# Altium schematic symbol library DIM.SCHLIB: 488 symbols (part 4 of 5)
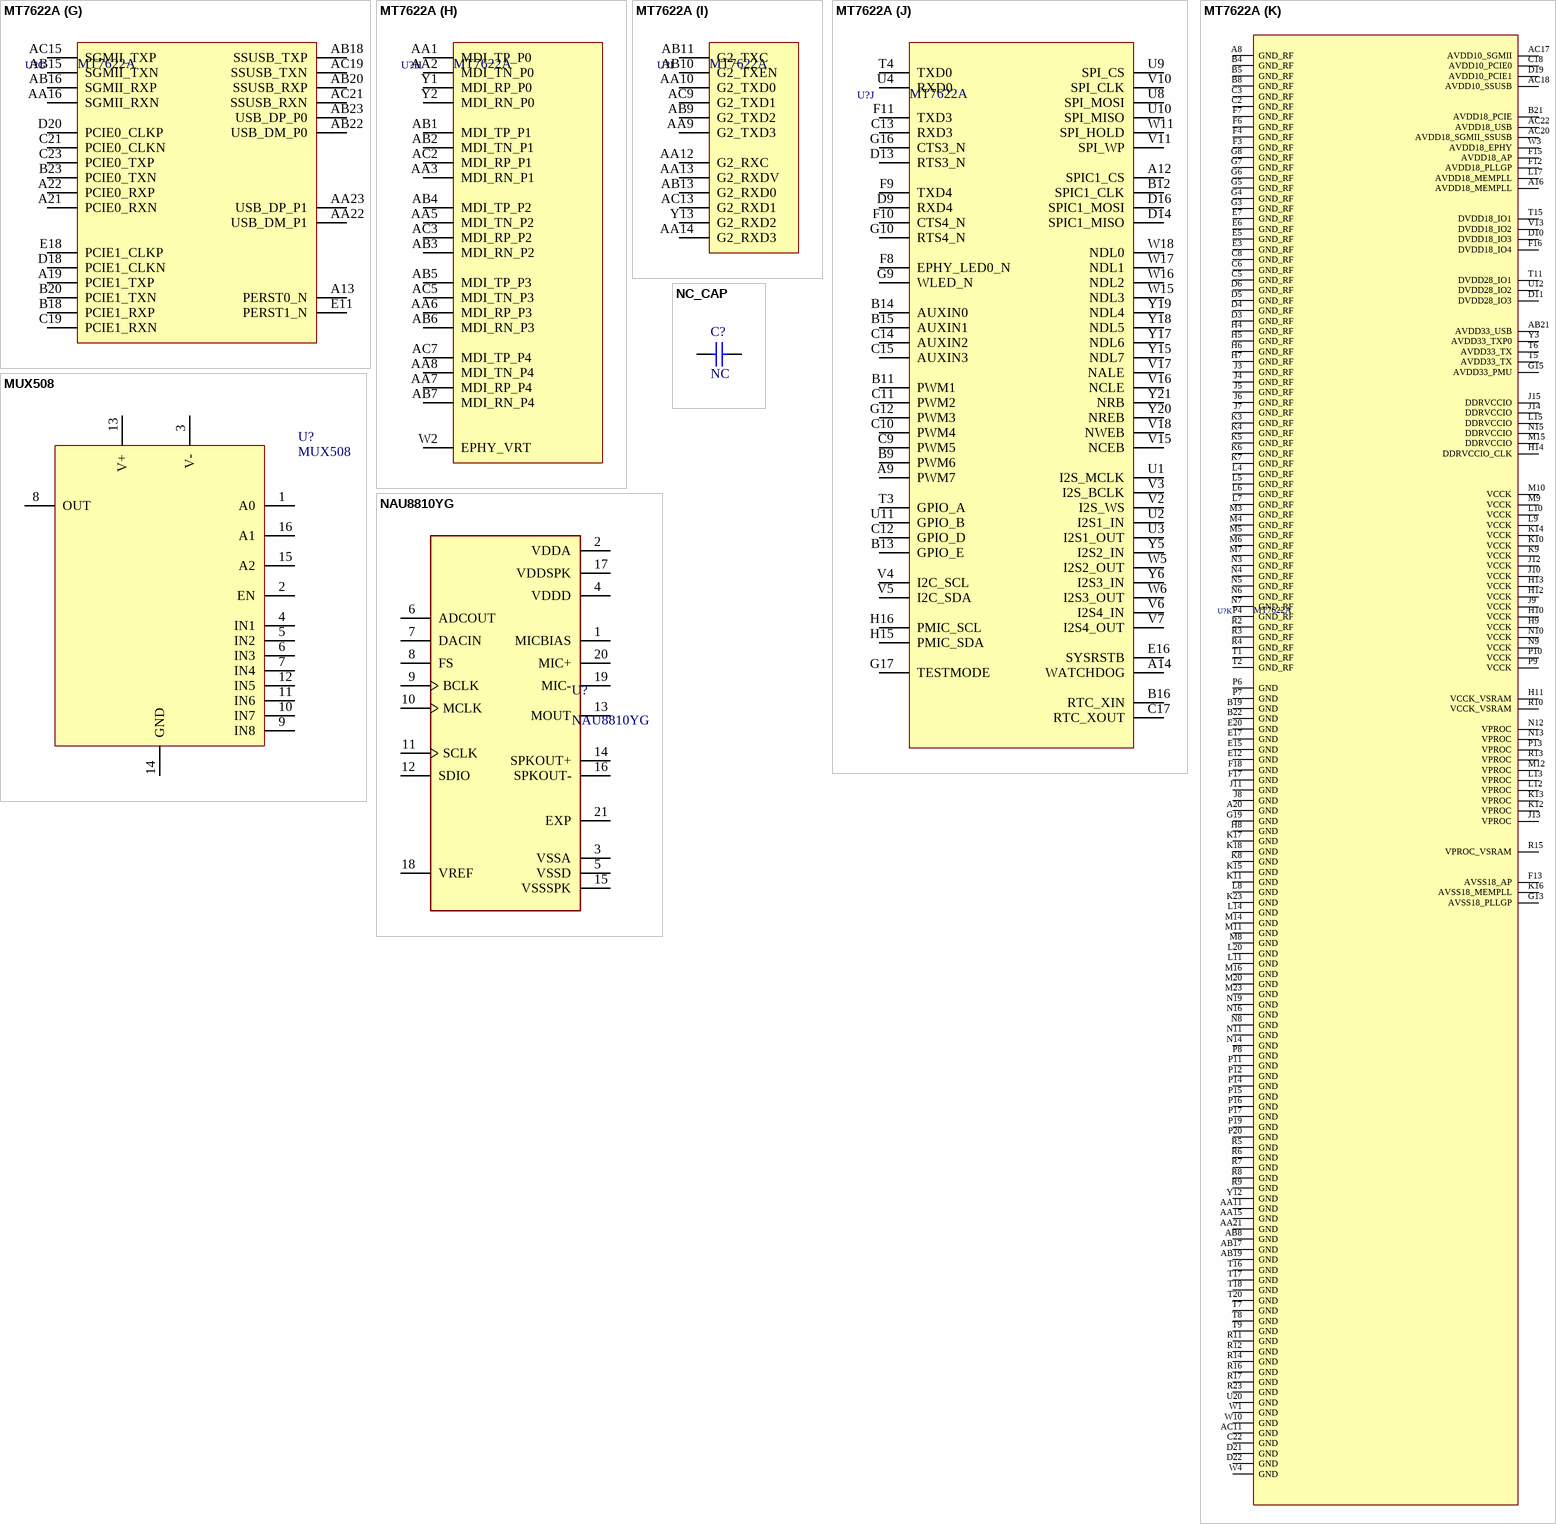
[diagram p28: symbols MT7622A to NC_CAP]

## NC_CAP
designator C?, comment NC
0402 (1005 Metric); Value: NC; Package: 0402 (1005 Metric)
footprint CAP 0402/1005 (Chip Capacitor, 2-Leads, Body 1.02x0.51mm, IPC Medium Density)
pins: 1, 2

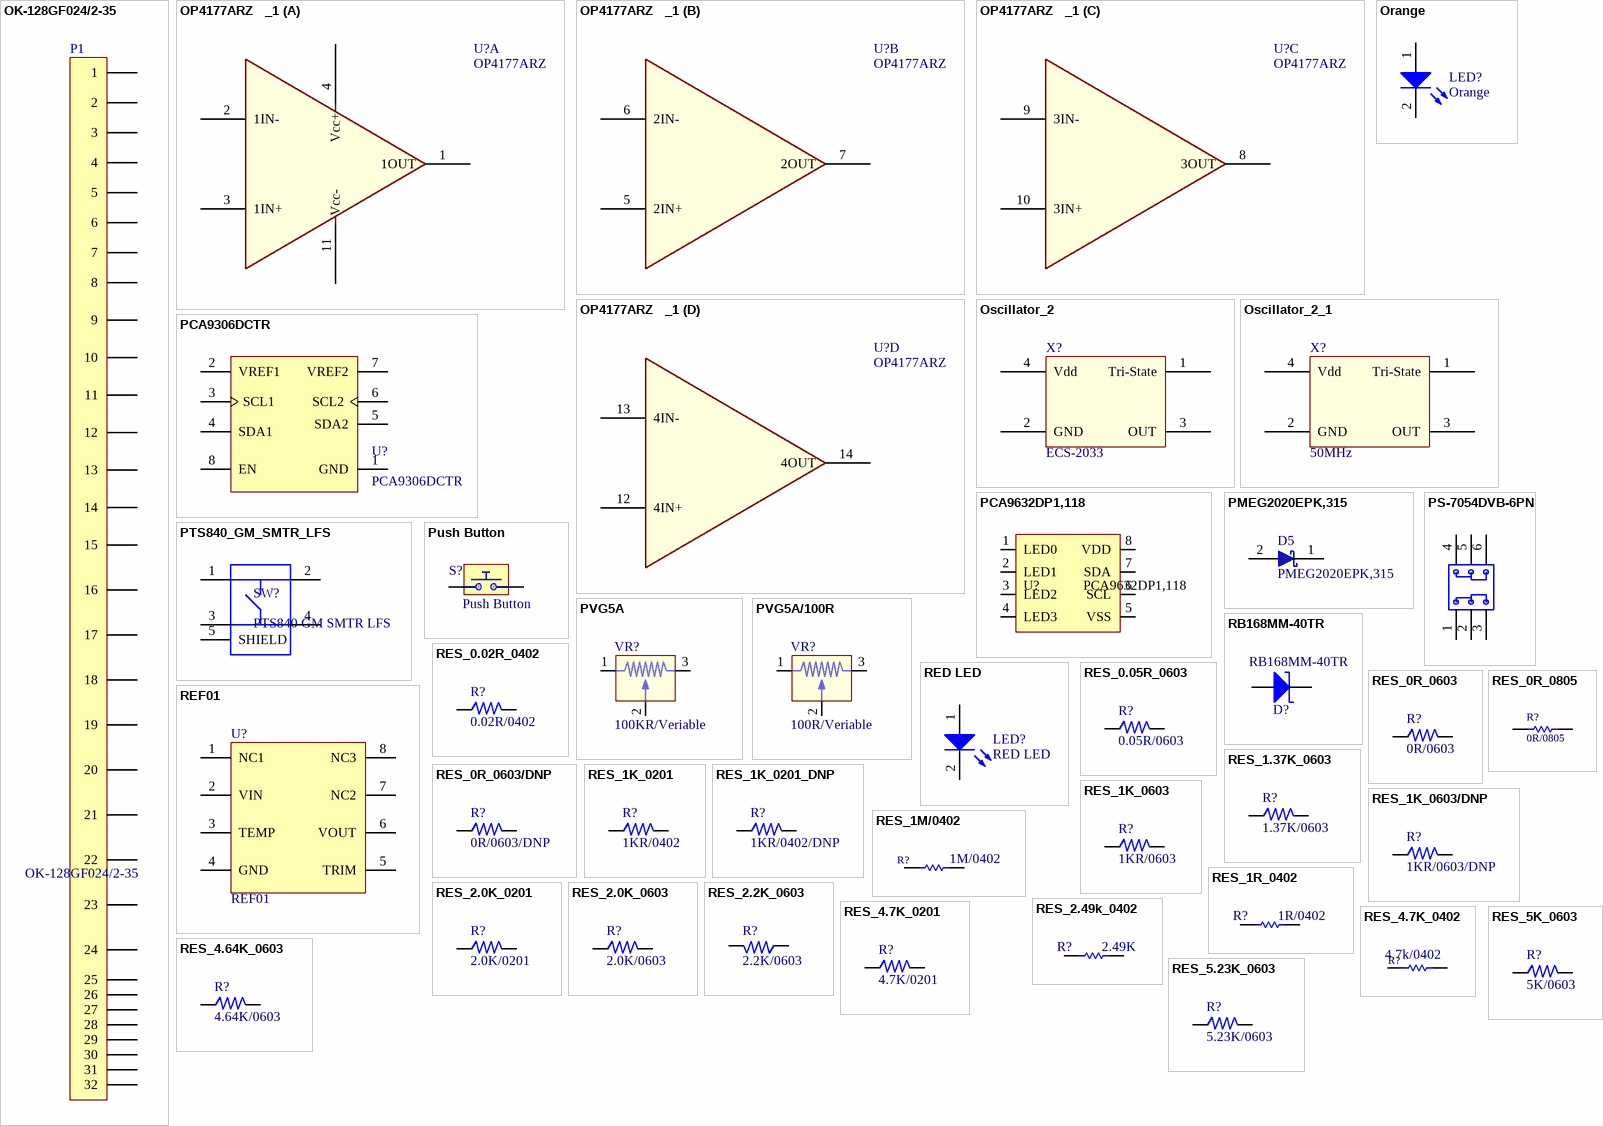
[diagram p20: symbols OK-128GF024/2-35 to RES_5K_0603]

## OK-128GF024/2-35
designator P1
Arrays, Edge Type, Mezzanine (Board to Board) ROHS; Manufacturer Part Number: OK-128GF024/2-35; Supplier: OK-128GF024/2-35; Supplier Part Number: OK-128GF024/2-35; Value: OK-128GF024/2-35
footprint OK-128GF024/2-35
pins: 1, 2, 3, 4, 5, 6, 7, 8, 9, 10, 11, 12, 13, 14, 15, 16, 17, 18, 19, 20, 21, 22, 23, 24, 25, 26, 27, 28, 29, 30, 31, 32

## OP4177ARZ   _1
designator U?, comment OP4177ARZ
IC OPAMP GP 4 CIRCUIT 14SOIC; Manufacturer: Analog Devices Inc.; Value: OP4177ARZ; Package: 14-SOIC (0.154", 3.90mm Width); Manufacturer Part Number: OP4177ARZ; Supplier: Digi-Key; Supplier Part Number: OP4177ARZ-ND; Operating Temperature: -40°C ~ 125°C
footprint SOIC-14
part A pins: 1 1OUT, 2 1IN-, 3 1IN+, 4 Vcc+, 11 Vcc-
part B pins: 5 2IN+, 6 2IN-, 7 2OUT
part C pins: 8 3OUT, 9 3IN-, 10 3IN+
part D pins: 12 4IN+, 13 4IN-, 14 4OUT

## Orange
designator LED?
10mA 无色透明透镜 -40℃~+85℃ 598nm~608nm Orange 120° 40mW 0603 Light Emitting Diodes (LED) ROHS; Manufacturer Part Number: SZYY0603O; Manufacturer: Yongyu Photoelectric; Package: 0603 (1608 Metric); Supplier Part Number: C434425; Value: Orange; Supplier: LCSC; Operating Temperature: -40°C ~ 100°C
footprint LED_1608L (Chip Capacitor, Body 1.6x0.8mm, IPC High Density)
pins: 1 A, 2 K

## Oscillator_2
designator X?, comment ECS-2033
Oscillator_ECS-2033; Manufacturer: ECS Inc.; Manufacturer Part Number: ECS-2033-160-AU; Value: ECS-2033; Package: 4-SMD, No Lead; Supplier: Digikey; Supplier Part Number: XC1858CT-ND
footprint ECS-2033
pins: 1 Tri-State, 2 GND, 3 OUT, 4 Vdd

## Oscillator_2_1
designator X?, comment 50MHz
Oscillator_ECS-2033; Manufacturer: ECS Inc.; Manufacturer Part Number: ECS-2033-500-AU; Value: 50MHz; Package: 4-SMD, No Lead; Supplier: Digikey; Supplier Part Number: XC1866CT-ND
footprint ECS-2033
pins: 1 Tri-State, 2 GND, 3 OUT, 4 Vdd

## PCA9306DCTR
designator U?
1.8V~5.5V 1 2 1.2V~3.3V SM-8 Translators / Level Shifters ROHS; Manufacturer: Texas Instruments; SPN: C123752; MPN: PCA9306DCTR; Package: SM-8; Supplier: LCSC; Value: PCA9306DCTR
footprint SOP65P400X130-8N
pins: 1 GND, 2 VREF1, 3 SCL1, 4 SDA1, 5 SDA2, 6 SCL2, 7  VREF2, 8 EN

## PCA9632DP1,118
designator U?
LED Lighting Drivers 4-BIT FM+I2C-BUS; Manufacturer: NXP Semiconductors; SPN: 771-PCA9632DP1118; Package: 0402; MPN: PCA9632DP1,118; Supplier: Mouser; Value: PCA9632DP1,118
pins: 1 LED0, 2 LED1, 3 LED2, 4 LED3, 5 VSS, 6 SCL, 7 SDA, 8 VDD

## PMEG2020EPK,315
designator D5
DIODE SCHOTTKY 20V 2A DFN1608D-2; MF: Nexperia USA Inc.; MPN: PMEG2020EPK,315; Package: DFN1608D-2; ComponentLink1URL: https://datasheet.ciiva.com/23793/1749685-23793352.pdf?src-supplier=Newark; ComponentLink1Description: https://datasheet.ciiva.com/23793/1749685-23793352.pdf?src-supplier=Newark
footprint PMEG2020EPK315
pins: 1 K, 2 A

## PS-7054DVB-6PN
designator SW?  (value not drawn)
SWITCH PUSH 500mA 24V; SPN: C22363820; MF: G-Switch(品赞); MPN: PS-7054DVB-6PN; Package: 6P,7x7mm; Supplier: LCSC
footprint SW-TH_6P-L7.0-W7.0-P2.00
pins: 1, 2, 3, 4, 5, 6

## PTS840_GM_SMTR_LFS
designator SW?, comment PTS840 GM SMTR LFS
Tactile Switch SPST-NO Side Actuated Surface Mount, Right Angle; MF: C&K; Price: None; SnapEDA_Link: https://www.snapeda.com/parts/PTS840%20GM%20SMTR%20LFS/C&K/view-part/628485/?ref=snap; MPN: PTS840 GM SMTR LFS; Availability: Unavailable; Value: *; Package: None
footprint SW_PTS840GMSMTRLFS
pins: 1, 2, 3, 4, 5 SHIELD

## Push Button
designator S?
2.93mm 2mm Round Button 50mA Brick nogging 3.9mm SPST 12V SMD,3x4mm Tactile Switches ROHS; Manufacturer: XUNPU; MPN: TS-1088R-02026; SPN: C455280; Value: Push Button; Package: SMD,3x4mm; Supplier: LCSC; Operating Temperature: -40°C ~ 85°C
pins: 1, 2

## PVG5A
designator VR?, comment 100KR/Veriable
100KR_Variable Resistor; Manufacturer: Bourns; Manufacturer Part Number: PVG5H104C03R00; Value: 100KR/Veriable; Package: PVG5A; Supplier: Mouser; Supplier Part Number: 81-PVG5H104C03R00
footprint PVG5A
pins: 1 A, 2 B, 3 C

## PVG5A/100R
designator VR?, comment 100R/Veriable
100R_Variable Resistor; Manufacturer: Bourns; Manufacturer Part Number: PVG5A101C03R00; Value: 100R/Veriable; Package: PVG5A; Supplier: Mouser; Supplier Part Number: 81-PVG5A101C03R00
footprint PVG5A
pins: 1 A, 2 B, 3 C

## RB168MM-40TR
designator D?
DIODE SCHOTTKY 40V 1A PMDU; Manufacturer: Rohm Semiconductor; Manufacturer Part Number: RB168MM-40TR; Package: SOD-123F; Supplier: Digi-Key; Supplier Part Number: RB168MM-40CT-ND; Unit Price: *; Value: RB168MM-40TR
footprint RB051MM_ROM
pins: 1 A, 2 K

## RED LED
designator LED?
LED RED CLEAR 625NM 0603 SMD; Manufacturer: QT Brightek (QTB); Manufacturer Part Number: QBLP601-R5; Package: 0603 (1608 Metric); Value: RED LED; Operating Temperature: -40°C ~ 100°C
pins: 1 A, 2 K

## REF01
designator U?
Voltage References 10V PREC VOLT REFERENCE IC; Manufacturer: Analog Devices; Manufacturer Part Number: 5962-8958101PA; Package: CDIP-8; Supplier: Mouser; Supplier Part Number: 584-5962-8958101PA; Unit Price: *; Value: REF01
footprint REF01
pins: 1 NC1, 2 VIN, 3 TEMP, 4 GND, 5 TRIM, 6 VOUT, 7 NC2, 8 NC3

## RES_0.02R_0402
designator R?, comment 0.02R/0402
RES 0.02 OHM 1% 1/3W 0402; Manufacturer: Panasonic Electronic Components; Manufacturer Part Number: ERJ-MFBAF20MX; Package: 0402 (1005 Metric); Supplier: Digi-Key; Supplier Part Number: P123666TR-ND; Value: 0.02R/0402; Operating Temperature: -55°C ~ 155°C
footprint RES 0402/1005 (Chip Resistor, 2-Leads, Body 1.0x0.5mm, IPC Medium Density)
pins: 1, 2

## RES_0.05R_0603
designator R?, comment 0.05R/0603
RES 0.05 OHM 1% 1/3W 0603; Manufacturer: Panasonic Electronic Components; Manufacturer Part Number: ERJ-3BWFR050V; Package: 0603 (1608 Metric); Supplier: Digi-Key; Supplier Part Number: P17472TR-ND; Value: 0.05R/0603
footprint RESC1608L (Chip Resistor, Body 1.6x0.8mm, IPC High Density)
pins: 1, 2

## RES_0R_0603
designator R?, comment 0R/0603
0R; Manufacturer: Yageo; Manufacturer Part Number: RC0603JR-070RL; Package: 0603 (1608 Metric); Supplier: Mouser; Supplier Part Number: 603-RC0603JR-070RL; Value: 0R/0603
footprint RESC1608L (Chip Resistor, Body 1.6x0.8mm, IPC High Density)
pins: 1, 2

## RES_0R_0603/DNP
designator R?, comment 0R/0603/DNP
0R; Manufacturer: Yageo; Manufacturer Part Number: RC0603JR-070RL; Package: 0603 (1608 Metric); Supplier: Mouser; Supplier Part Number: 603-RC0603JR-070RL; Value: 0R/0603/DNP
footprint RESC1608L (Chip Resistor, Body 1.6x0.8mm, IPC High Density)
pins: 1, 2

## RES_0R_0805
designator R?, comment value 0R/0805  (hidden comment: Resistor)
0 Ohms Jumper 0.125W, 1/8W Chip Resistor 0805 (2012 Metric) Automotive AEC-Q200 Thick Film; Manufacturer: Vishay Dale; Manufacturer Part Number: CRCW08050000Z0EA; Package: 0805 (2012 Metric); Supplier: Digikey; Supplier Part Number: 541-0.0ATR-ND; Temperature: -55 to 155
footprint RES 0805/2012 (Chip Resistor, 2-Leads, Body 2.00x1.25mm, IPC High Density)
pins: 1, 2

## RES_1.37K_0603
designator R?, comment 1.37K/0603
RES SMD 1.37K OHM 1% 1/10W 0603; Manufacturer: Yageo; Manufacturer Part Number: RC0603FR-071K37L; Package: 0603 (1608 Metric); Supplier: Digi-Key; Supplier Part Number: 311-1.37KHRTR-ND; Value: 1.37K/0603
footprint RESC1608L (Chip Resistor, Body 1.6x0.8mm, IPC High Density)
pins: 1, 2

## RES_1K_0201
designator R?, comment 1KR/0402
RES SMD 1K OHM 1% 1/20W 0201; Manufacturer: Yageo; Manufacturer Part Number: RC0201FR-071KL; Package: 0201 (0603 Metric); Supplier: Digi-Key; Supplier Part Number: 311-1KMTR-ND; Value: 1KR/0402
footprint RES 0201/0603 (Chip Resistor, 2-Leads, Body 0.60x0.30mm, IPC Medium Density)
pins: 1, 2

## RES_1K_0201_DNP
designator R?, comment 1KR/0402/DNP
RES SMD 1K OHM 1% 1/20W 0201; Manufacturer: Yageo; Manufacturer Part Number: RC0201FR-071KL; Package: 0201 (0603 Metric); Supplier: Digi-Key; Supplier Part Number: 311-1KMTR-ND; Value: 1KR/0402/DNP
footprint RES 0201/0603 (Chip Resistor, 2-Leads, Body 0.60x0.30mm, IPC Medium Density)
pins: 1, 2

## RES_1K_0603
designator R?, comment 1KR/0603
1KR, 0.25w, 1%; Manufacturer: Rohm Semiconductor; Manufacturer Part Number: ESR03EZPF1001; Package: 0603 (1608 Metric); Supplier: Digi-Key; Supplier Part Number: RHM1.00KADCT-ND; Value: 1KR/0603
footprint RESC1608L (Chip Resistor, Body 1.6x0.8mm, IPC High Density)
pins: 1, 2

## RES_1K_0603/DNP
designator R?, comment 1KR/0603/DNP
1KR, 0.25w, 1%; Manufacturer: Rohm Semiconductor; Manufacturer Part Number: ESR03EZPF1001; Package: 0603 (1608 Metric); Supplier: Digi-Key; Supplier Part Number: RHM1.00KADCT-ND; Value: 1KR/0603/DNP
footprint RESC1608L (Chip Resistor, Body 1.6x0.8mm, IPC High Density)
pins: 1, 2

## RES_1M/0402
designator R?, comment 1M/0402
RES SMD 1M OHM 1% 1/10W 0603; Manufacturer: Rohm Semiconductor; Manufacturer Part Number: ESR01MZPJ105; Package: 0402; Supplier: Digikey; Supplier Part Number: RHM1005CT-ND; Temperature: -55 to 155; Value: 1M/0402
footprint RES 0402/1005 (Chip Resistor, 2-Leads, Body 1.0x0.5mm, IPC Medium Density)
pins: 1, 2

## RES_1R_0402
designator R?, comment 1R/0402
Resistor; Manufacturer: Vishay Dale; Manufacturer Part Number: CRCW04021R00JNEDHP; Package: 0402 (1005 Metric); Supplier: DigiKey; Supplier Part Number: 541-1.0YATR-ND; Temperature: -55°C ~ 155°C; Value: 1R/0402
footprint RES 0402/1005 (Chip Resistor, 2-Leads, Body 1.0x0.5mm, IPC Medium Density)
pins: 1, 2

## RES_2.0K_0201
designator R?, comment 2.0K/0201
RES SMD 2K OHM 5% 1/20W 0201; Manufacturer: Yageo; Manufacturer Part Number: RC0201JR-072KL; Package: 0201 (0603 Metric); Supplier: Digi-Key; Supplier Part Number: 311-2KNTR-ND; Value: 2.0K/0201
footprint RES 0201/0603 (Chip Resistor, 2-Leads, Body 0.60x0.30mm, IPC Medium Density)
pins: 1, 2

## RES_2.0K_0603
designator R?, comment 2.0K/0603
RES 2K OHM 0.01% 1/10W 0603; Manufacturer: Stackpole Electronics Inc; Manufacturer Part Number: RNCF0603TKY2K00; Package: 0603 (1608 Metric); Supplier: Digi-Key; Supplier Part Number: RNCF0603TKY2K00TR-ND; Value: 2.0K/0603
footprint RES 0603/1608 (Chip Resistor, 2-Leads, Body 1.60x0.80mm, IPC Medium Density)
pins: 1, 2

## RES_2.2K_0603
designator R?, comment 2.2K/0603
2.2KR; Manufacturer: Yageo; Manufacturer Part Number: SR0603KR-7W2K2L; Package: 0603 (1608 Metric); Supplier: Digi-Key; Supplier Part Number: SR0603KR-7W2K2L-ND; Value: 2.2K/0603; Operating Temperature: -55°C ~ 155°C
footprint RESC1608L (Chip Resistor, Body 1.6x0.8mm, IPC High Density)
pins: 1, 2

## RES_2.49k_0402
designator R?, comment 2.49K
RES 2.49K OHM 1% 1/16W 0402; Manufacturer: Stackpole Electronics Inc; Manufacturer Part Number: RMCF0402FT2K49; Package: 0402 (1005 Metric); Supplier: DigiKey; Supplier Part Number: RMCF0402FT2K49TR-ND; Temperature: -55°C ~ 155°C; Value: 2.49K
footprint RES 0402/1005 (Chip Resistor, 2-Leads, Body 1.0x0.5mm, IPC Medium Density)
pins: 1, 2

## RES_4.7K_0201
designator R?, comment 4.7K/0201
RES SMD 4.7K OHM 1% 1/20W 0201; Manufacturer: Yageo; Manufacturer Part Number: RC0201FR-074K7L; Package: 0201 (0603 Metric); Supplier: Digi-Key; Supplier Part Number: 311-4.70KMTR-ND; Value: 4.7K/0201
footprint RES 0201/0603 (Chip Resistor, 2-Leads, Body 0.60x0.30mm, IPC Medium Density)
pins: 1, 2

## RES_4.7K_0402
designator R?, comment 4.7k/0402
RES SMD 1M OHM 1% 1/10W 0603; Manufacturer: Rohm Semiconductor; Manufacturer Part Number: ESR01MZPJ105; Package: 0402; Supplier: Digikey; Supplier Part Number: RHM1005CT-ND; Temperature: -55 to 155; Value: 4.7k/0402
footprint RES 0402/1005 (Chip Resistor, 2-Leads, Body 1.0x0.5mm, IPC Medium Density)
pins: 1, 2

## RES_4.64K_0603
designator R?, comment 4.64K/0603
RES SMD 4.64K OHM 0.1% 1/5W 0603; Manufacturer: Panasonic Electronic Components; Manufacturer Part Number: ERJ-PB3B4641V; Package: 0603 (1608 Metric); Supplier: Digi-Key; Supplier Part Number: P20047CT-ND; Value: 4.64K/0603
footprint RESC1608L (Chip Resistor, Body 1.6x0.8mm, IPC High Density)
pins: 1, 2

## RES_5.23K_0603
designator R?, comment 5.23K/0603
RES SMD 5.23K OHM 1% 1/10W 0603; Manufacturer: Yageo; Manufacturer Part Number: RC0603FR-075K23L; Package: 0603 (1608 Metric); Supplier: Digi-Key; Supplier Part Number: 311-5.23KHRTR-ND; Value: 5.23K/0603
footprint RESC1608L (Chip Resistor, Body 1.6x0.8mm, IPC High Density)
pins: 1, 2

## RES_5K_0603
designator R?, comment 5K/0603
RES SMD 5K OHM 0.1% 0.15W 0603; Manufacturer: Vishay Thin Film; Manufacturer Part Number: PNM0603E5001BST5; Package: 0603 (1608 Metric); Supplier: Digi-Key; Supplier Part Number: PNM0603-5.0KBCT-ND; Value: 5K/0603
footprint RESC1608L (Chip Resistor, Body 1.6x0.8mm, IPC High Density)
pins: 1, 2

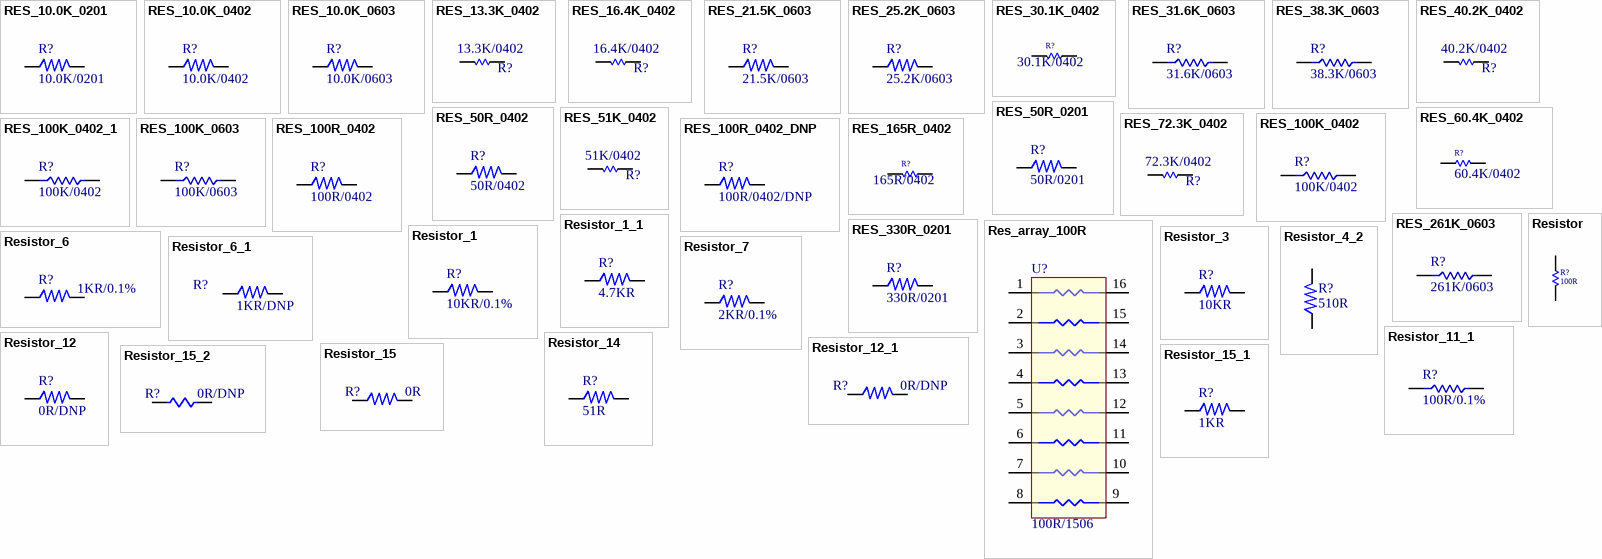
[diagram p21: symbols RES_10.0K_0201 to Resistor_15_2]

## RES_10.0K_0201
designator R?, comment 10.0K/0201
RES SMD 10K OHM 1% 1/20W 0201; Manufacturer: Yageo; Manufacturer Part Number: RC0201FR-0710KL; Package: 0201 (0603 Metric); Supplier: Digi-Key; Supplier Part Number: 311-10.0KMTR-ND; Value: 10.0K/0201
footprint RES 0201/0603 (Chip Resistor, 2-Leads, Body 0.60x0.30mm, IPC Medium Density)
pins: 1, 2

## RES_10.0K_0402
designator R?, comment 10.0K/0402
RES SMD 10K OHM 1% 1/16W 0402; Manufacturer: Yageo; Manufacturer Part Number: RC0402FR-0710KL; Package: 0402 (1005 Metric); Supplier: Digi-Key; Supplier Part Number: 311-10.0KLRTR-ND; Value: 10.0K/0402; Operating Temperature: -55°C ~ 155°C
footprint RES 0402/1005 (Chip Resistor, 2-Leads, Body 1.0x0.5mm, IPC Medium Density)
pins: 1, 2

## RES_10.0K_0603
designator R?, comment 10.0K/0603
RES 10K OHM 0.1% 1/8W 0603; Manufacturer: Vishay Dale; Manufacturer Part Number: TNPW060310K0BEEA; Package: 0603 (1608 Metric); Supplier: Digi-Key; Supplier Part Number: TNP10.0KAACT-ND; Value: 10.0K/0603; Operating Temperature: -55°C ~ 155°C
footprint RESC1608L (Chip Resistor, Body 1.6x0.8mm, IPC High Density)
pins: 1, 2

## RES_13.3K_0402
designator R?, comment 13.3K/0402
RES SMD 10K OHM 1% 1/16W 0402; Manufacturer: Panasonic Electronic Components; Manufacturer Part Number: ERA-2AEB1332X; Package: 0402; Supplier: Digikey; Supplier Part Number: P13.3KDCTR-ND; Temperature: -55°C ~ 155°C; value: 13.3K/0402
footprint RES 0402/1005 (Chip Resistor, 2-Leads, Body 1.0x0.5mm, IPC Medium Density)
pins: 1, 2

## RES_16.4K_0402
designator R?, comment 16.4K/0402
RES 16.4K OHM 0.1% 1/16W 0402; Manufacturer: Yageo; Manufacturer Part Number: RT0402BRD0716K4L; Package: 0402; Supplier: Digikey; Supplier Part Number: RT0402BRD0716K4L-ND; Temperature: -55°C ~ 155°C; value: 16.4K/0402
footprint RES 0402/1005 (Chip Resistor, 2-Leads, Body 1.0x0.5mm, IPC Medium Density)
pins: 1, 2

## RES_21.5K_0603
designator R?, comment 21.5K/0603
RES 21.5K OHM 0.1% 1/8W 0603; Manufacturer: Vishay Dale; Manufacturer Part Number: TNPW060321K5BEEA; Package: 0603 (1608 Metric); Supplier: Digi-Key; Supplier Part Number: 541-2005-6-ND; Value: 21.5K/0603
footprint RESC1608L (Chip Resistor, Body 1.6x0.8mm, IPC High Density)
pins: 1, 2

## RES_25.2K_0603
designator R?, comment 25.2K/0603
25.2KR; Manufacturer: Yageo; Manufacturer Part Number: RT0603DRE0725K2L; Package: 0603 (1608 Metric); Supplier: Digi-Key; Supplier Part Number: RT0603DRE0725K2L-ND; Value: 25.2K/0603; Operating Temperature: -55°C ~ 155°C
footprint RESC1608L (Chip Resistor, Body 1.6x0.8mm, IPC High Density)
pins: 1, 2

## RES_30.1K_0402
designator R?, comment 30.1K/0402
RES SMD 10K OHM 1% 1/16W 0402; Manufacturer: Vishay Dale; Manufacturer Part Number: TNPW040230K1BEED; Package: 0402 (1005 Metric); Supplier: DigiKey; Supplier Part Number: TNP30.1KDATR-ND; Temperature: -55°C ~ 155°C; value: 30.1K/0402
footprint RES 0402/1005 (Chip Resistor, 2-Leads, Body 1.0x0.5mm, IPC Medium Density)
pins: 1, 2

## RES_31.6K_0603
designator R?, comment 31.6K/0603
RES 31.6 KOHM 0.1% 1/16W 0603; Manufacturer: Susumu; Manufacturer Part Number: RGT1608P-3162-B-T5; Package: 0603; Supplier Part Number: 408-2092-2-ND; Value: 31.6K/0603; Supplier: Digi-Key; Operating Temperature: -55°C ~ 155°C; Supplier Availability: Active
footprint RESC1608L (Chip Resistor, Body 1.6x0.8mm, IPC High Density)
pins: 1, 2

## RES_38.3K_0603
designator R?, comment 38.3K/0603
RES SMD 38.3KOHM 0.1% 1/10W 0603; Manufacturer: Yageo; Manufacturer Part Number: RT0603BRD0738K3L; Package: 0603; Supplier Part Number: YAG4541DKR-ND; Value: 38.3K/0603; Supplier: Digi-Key; Operating Temperature: -55°C ~ 155°C; Supplier Availability: Active
footprint RESC1608L (Chip Resistor, Body 1.6x0.8mm, IPC High Density)
pins: 1, 2

## RES_40.2K_0402
designator R?, comment 40.2K/0402
RES 40.2K OHM 1% 1/16W 0402; Manufacturer: Stackpole Electronics Inc; Manufacturer Part Number: RMCF0402FT40K2; Package: 0402; Supplier: Digikey; Supplier Part Number: RMCF0402FT40K2TR-ND; Temperature: -55°C ~ 155°C; value: 40.2K/0402
footprint RES 0402/1005 (Chip Resistor, 2-Leads, Body 1.0x0.5mm, IPC Medium Density)
pins: 1, 2

## RES_50R_0201
designator R?, comment 50R/0201
RES SMD 50 OHM 1% 1/20W 0201; Manufacturer: Anaren; Manufacturer Part Number: R1A060350R0G5AR; Package: 0201 (0603 Metric); Supplier: Digi-Key; Supplier Part Number: 1173-1037-1-ND; Value: 50R/0201
footprint RES 0201/0603 (Chip Resistor, 2-Leads, Body 0.60x0.30mm, IPC Medium Density)
pins: 1, 2

## RES_50R_0402
designator R?, comment 50R/0402
RES SMD 50 OHM 0.1% 1/20W 0402; Manufacturer: Vishay Thin Film; Manufacturer Part Number: FC0402E50R0BST1; Package: 0402 (1005 Metric); Supplier: Digi-Key; Supplier Part Number: FC0402-50BWTR-ND; Value: 50R/0402
footprint RES 0402/1005 (Chip Resistor, 2-Leads, Body 1.0x0.5mm, IPC Medium Density)
pins: 1, 2

## RES_51K_0402
designator R?, comment 51K/0402
RES SMD 51K OHM 0.1% 1/16W 0402; Manufacturer: Panasonic Electronic Components; Manufacturer Part Number: ERA-2AEB513X; Package: 0402; Supplier: Digikey; Supplier Part Number: P51KDCTR-ND; Temperature: -55°C ~ 155°C; value: 51K/0402
footprint RES 0402/1005 (Chip Resistor, 2-Leads, Body 1.0x0.5mm, IPC Medium Density)
pins: 1, 2

## RES_60.4K_0402
designator R?, comment 60.4K/0402
RES SMD 10K OHM 1% 1/16W 0402; Manufacturer: Panasonic Electronic Components; Manufacturer Part Number: ERA-2AEB6042X; Package: 0402 (1005 Metric); Supplier: DigiKey; Supplier Part Number: P60.4KDCTR-ND; Temperature: -55°C ~ 155°C; value: 60.4K/0402
footprint RES 0402/1005 (Chip Resistor, 2-Leads, Body 1.0x0.5mm, IPC Medium Density)
pins: 1, 2

## RES_72.3K_0402
designator R?, comment 72.3K/0402
RES 72.3K OHM 0.5% 1/16W 0402; Manufacturer: KOA Speer Electronics, Inc.; Manufacturer Part Number: RN73R1ETTP7232D25; Package: 0402; Supplier: Digikey; Supplier Part Number: 2019-RN73R1ETTP7232D25TR-ND; Temperature: -55°C ~ 155°C; value: 72.3K/0402
footprint RES 0402/1005 (Chip Resistor, 2-Leads, Body 1.0x0.5mm, IPC Medium Density)
pins: 1, 2

## RES_100K_0402
designator R?, comment 100K/0402
RES SMD 100K OHM 0.1% 1/16W 0402; Manufacturer: Yageo; Manufacturer Part Number: RT0402BRD07100KL; Package: 0402 (1005 Metric); Supplier Part Number: YAG1343TR-ND; Value: 100K/0402; Supplier: Digi-Key; Operating Temperature: -55°C ~ 155°C; Supplier Availability: Active
footprint RES 0402/1005 (Chip Resistor, 2-Leads, Body 1.0x0.5mm, IPC Medium Density)
pins: 1, 2

## RES_100K_0402_1
designator R?, comment 100K/0402
RES SMD 100K OHM 0.1% 1/16W 0402; Manufacturer: Yageo; Manufacturer Part Number: RT0402BRD07100KL; Package: 0402 (1005 Metric); Supplier Part Number: YAG1343TR-ND; Value: 100K/0402; Supplier: Digi-Key; Operating Temperature: -55°C ~ 155°C; Supplier Availability: Active
footprint RES 0402/1005 (Chip Resistor, 2-Leads, Body 1.0x0.5mm, IPC Medium Density)
pins: 1, 2

## RES_100K_0603
designator R?, comment 100K/0603
100KR 0.1% 1/10W 0603; Manufacturer: Panasonic Electronic Components; Manufacturer Part Number: ERA-3AEB104V; Package: 0603 (1608 Metric); Supplier Part Number: P100KDBTR-ND; Value: 100K/0603; Supplier: Digi-Key; Operating Temperature: -55°C ~ 155°C; Supplier Availability: Active
footprint RESC1608L (Chip Resistor, Body 1.6x0.8mm, IPC High Density)
pins: 1, 2

## RES_100R_0402
designator R?, comment 100R/0402
RES SMD 100 OHM 1% 1/16W 0402; Manufacturer: Yageo; Manufacturer Part Number: RC0402FR-07100RL; Package: 0402 (1005 Metric); Supplier: Digi-Key; Supplier Part Number: 311-100LRTR-ND; Value: 100R/0402; Operating Temperature: -55°C ~ 155°C
footprint RES 0402/1005 (Chip Resistor, 2-Leads, Body 1.0x0.5mm, IPC Medium Density)
pins: 1, 2

## RES_100R_0402_DNP
designator R?, comment 100R/0402/DNP
RES SMD 100 OHM 1% 1/16W 0402; Manufacturer: Yageo; Manufacturer Part Number: RC0402FR-07100RL; Package: 0402 (1005 Metric); Supplier: Digi-Key; Supplier Part Number: 311-100LRTR-ND; Value: 100R/0402/DNP; Operating Temperature: -55°C ~ 155°C
footprint RES 0402/1005 (Chip Resistor, 2-Leads, Body 1.0x0.5mm, IPC Medium Density)
pins: 1, 2

## RES_165R_0402
designator R?, comment 165R/0402
RES SMD 10K OHM 1% 1/16W 0402; Manufacturer: Yageo; Manufacturer Part Number: RC0402FR-07165RL; Package: 0402 (1005 Metric); Supplier: DigiKey; Supplier Part Number: YAG2999TR-ND; Temperature: -55°C ~ 155°C; value: 165R/0402
footprint RES 0402/1005 (Chip Resistor, 2-Leads, Body 1.0x0.5mm, IPC Medium Density)
pins: 1, 2

## RES_261K_0603
designator R?, comment 261K/0603
RES SMD 261K OHM 0.1% 1/10W 0603; Manufacturer: Yageo; Manufacturer Part Number: RT0603BRD07261KL; Package: 0603; Supplier Part Number: YAG1601TR-ND; Value: 261K/0603; Supplier: Digi-Key; Operating Temperature: -55°C ~ 155°C; Supplier Availability: Active
footprint RESC1608L (Chip Resistor, Body 1.6x0.8mm, IPC High Density)
pins: 1, 2

## RES_330R_0201
designator R?, comment 330R/0201
RES 330 OHM 1% 1/20W 0201; Manufacturer: Stackpole Electronics Inc; Manufacturer Part Number: RMCF0201FT330R; Package: 0201 (0603 Metric); Supplier: Digi-Key; Supplier Part Number: RMCF0201FT330RTR-ND; Value: 330R/0201
footprint RES 0201/0603 (Chip Resistor, 2-Leads, Body 0.60x0.30mm, IPC Medium Density)
pins: 1, 2

## Res_array_100R
designator U?, comment 100R/1506
EXB-2HV101JV; Manufacturer: Panasonic Electronic Components; Value: 100R/1506; Package: 1506; Manufacturer Part Number: EXB-2HV101JV; Supplier: Digikey; Operating Temperature: -55°C ~ 125°C
footprint EXB-2HV472JV
pins: 1, 2, 3, 4, 5, 6, 7, 8, 9, 10, 11, 12, 13, 14, 15, 16

## Resistor
designator R?, comment 100R
RES SMD 100 OHM 0.5% 1/16W 0402; Manufacturer Part Number: ERA-2AED101X; Manufacturer: Panasonic Electronic Components; TEMP: -55°C ~ 155°C; package: 0402 (1005 Metric); Supplier: Digikey; Supplier Part Number: P100DETR-ND; value: 100R
footprint CAPC1005L (Chip Capacitor, Body 1.0x0.5mm, IPC High Density)
pins: 1, 2

## Resistor_1
designator R?, comment 10KR/0.1%
RES 10K OHM 0.1% 1/8W 0603; Manufacturer: Vishay Dale; Manufacturer Part Number: TNPW060310K0BEEA; Package: 0603 (1608 Metric); Supplier: Digi-Key; Supplier Part Number: TNP10.0KAACT-ND; Value: 10KR/0.1%; Operating Temperature: -55°C ~ 155°C
footprint CAPC1608L (Chip Capacitor, Body 1.6x0.8mm, IPC High Density)
pins: 1, 2

## Resistor_1_1
designator R?, comment 4.7KR
4.7 kOhms ±5% 0.25W; Manufacturer: Rohm Semiconductor; Manufacturer Part Number: ESR03EZPJ472; Package: 0603 (1608 Metric); Supplier: Digi-Key; Supplier Part Number: RHM4.7KDCT-ND; Value: 4.7KR
footprint RESC1608L (Chip Resistor, Body 1.6x0.8mm, IPC High Density)
pins: 1, 2

## Resistor_3
designator R?, comment 10KR
10KR, 0.25w, 1%; Manufacturer: Vishay Beyschlag; Manufacturer Part Number: MCT0603PD1002DP500; Package: 0603 (1608 Metric); Supplier: Digi-Key; Supplier Part Number: 749-1528-1-ND; Value: 10KR
footprint CAPC1608L (Chip Capacitor, Body 1.6x0.8mm, IPC High Density)
pins: 1, 2

## Resistor_4_2
designator R?, comment 510R
510R,0.2W; Manufacturer: Yageo; Manufacturer Part Number: SR0603KR-7W510RL; Package: 0603 (1608 Metric); Supplier: Digi-Key; Supplier Part Number: SR0603KR-7W510RL-ND; Value: 510R; Operating Temperature: -55°C ~ 155°C
footprint CAPC1608L (Chip Capacitor, Body 1.6x0.8mm, IPC High Density)
pins: 1, 2

## Resistor_6
designator R?, comment 1KR/0.1%
RES 1K OHM 0.1% 1/8W 0603; Manufacturer: Vishay Dale; Manufacturer Part Number: TNPW06031K00BXEN; Package: 0603 (1608 Metric); Supplier: Digi-Key; Supplier Part Number: 541-1724-1-ND; Value: 1KR/0.1%; Operating Temperature: -55°C ~ 155°C
footprint CAPC1608L (Chip Capacitor, Body 1.6x0.8mm, IPC High Density)
pins: 1, 2

## Resistor_6_1
designator R?, comment 1KR/DNP
RES 1K OHM 0.1% 1/8W 0603; Manufacturer: Vishay Dale; Manufacturer Part Number: TNPW06031K00BXEN; Package: 0603 (1608 Metric); Supplier: Digi-Key; Supplier Part Number: 541-1724-1-ND; Value: 1KR/DNP; Operating Temperature: -55°C ~ 155°C
footprint CAPC1608L (Chip Capacitor, Body 1.6x0.8mm, IPC High Density)
pins: 1, 2

## Resistor_7
designator R?, comment 2KR/0.1%
RES SMD 2K OHM 0.1% 1/10W 0603; Manufacturer: Vishay Dale; Manufacturer Part Number: TNPU06032K00BZEN00; Package: 0603 (1608 Metric); Supplier: Digi-Key; Supplier Part Number: TNPU2.00KBACT-ND; Value: 2KR/0.1%; Operating Temperature: -55°C ~ 155°C
footprint CAPC1608L (Chip Capacitor, Body 1.6x0.8mm, IPC High Density)
pins: 1, 2

## Resistor_11_1
designator R?, comment 100R/0.1%
100R 0.1% 1/8W; Manufacturer: Yageo; Manufacturer Part Number: RT0805BRD07100RL; Package: 0805; Supplier Part Number: YAG1760CT-ND; Value: 100R/0.1%; Supplier: Digi-Key; Operating Temperature: -55°C ~ 155°C
footprint RESC2012L (Chip Resistor, Body 2.0x1.3mm, IPC High Density)
pins: 1, 2

## Resistor_12
designator R?, comment 0R/DNP
0R; Manufacturer: Yageo; Manufacturer Part Number: RC0603JR-070RL; Package: 0603 (1608 Metric); Supplier: Mouser; Supplier Part Number: 603-RC0603JR-070RL; Value: 0R/DNP
footprint CAPC1608L (Chip Capacitor, Body 1.6x0.8mm, IPC High Density)
pins: 1, 2

## Resistor_12_1
designator R?, comment 0R/DNP
0R; Manufacturer: Yageo; Manufacturer Part Number: RC0603JR-070RL; Package: 0603 (1608 Metric); Supplier: Mouser; Supplier Part Number: 603-RC0603JR-070RL; Value: 0R/DNP
footprint RESC1608L (Chip Resistor, Body 1.6x0.8mm, IPC High Density)
pins: 1, 2

## Resistor_14
designator R?, comment 51R
51R, 0.5w, 1%; Manufacturer: Vishay / Draloric; Manufacturer Part Number: CRCW080551R0FKEAHP; Package: 0805 (2012 metric); Supplier: Mouser; Supplier Part Number: 71-CRCW080551R0FKEAH; Value: 51R
footprint RESC2012L (Chip Resistor, Body 2.0x1.3mm, IPC High Density)
pins: 1, 2

## Resistor_15
designator R?, comment 0R
Manufacturer: Yageo; Manufacturer Part Number: RC0603JR-070RL; Package: 0603 (1608 metric); Supplier: Mouser; Supplier Part Number: 603-RC0603JR-070RL; Value: 0R; Operating Temperature: -55°C ~ 155°C
footprint CAPC1608L (Chip Capacitor, Body 1.6x0.8mm, IPC High Density)
pins: 1, 2

## Resistor_15_1
designator R?, comment 1KR
1KR, 0.25w, 1%; Manufacturer: Rohm Semiconductor; Manufacturer Part Number: ESR03EZPF1001; Package: 0603 (1608 Metric); Supplier: Digi-Key; Supplier Part Number: RHM1.00KADCT-ND; Value: 1KR
footprint RESC1608L (Chip Resistor, Body 1.6x0.8mm, IPC High Density)
pins: 1, 2

## Resistor_15_2
designator R?, comment 0R/DNP
Manufacturer: Yageo; Manufacturer Part Number: RC0603JR-070RL; Package: 0603 (1608 metric); Supplier: Mouser; Supplier Part Number: 603-RC0603JR-070RL; Value: 0R/DNP; Operating Temperature: -55°C ~ 155°C
footprint CAPC1608L (Chip Capacitor, Body 1.6x0.8mm, IPC High Density)
pins: 1, 2

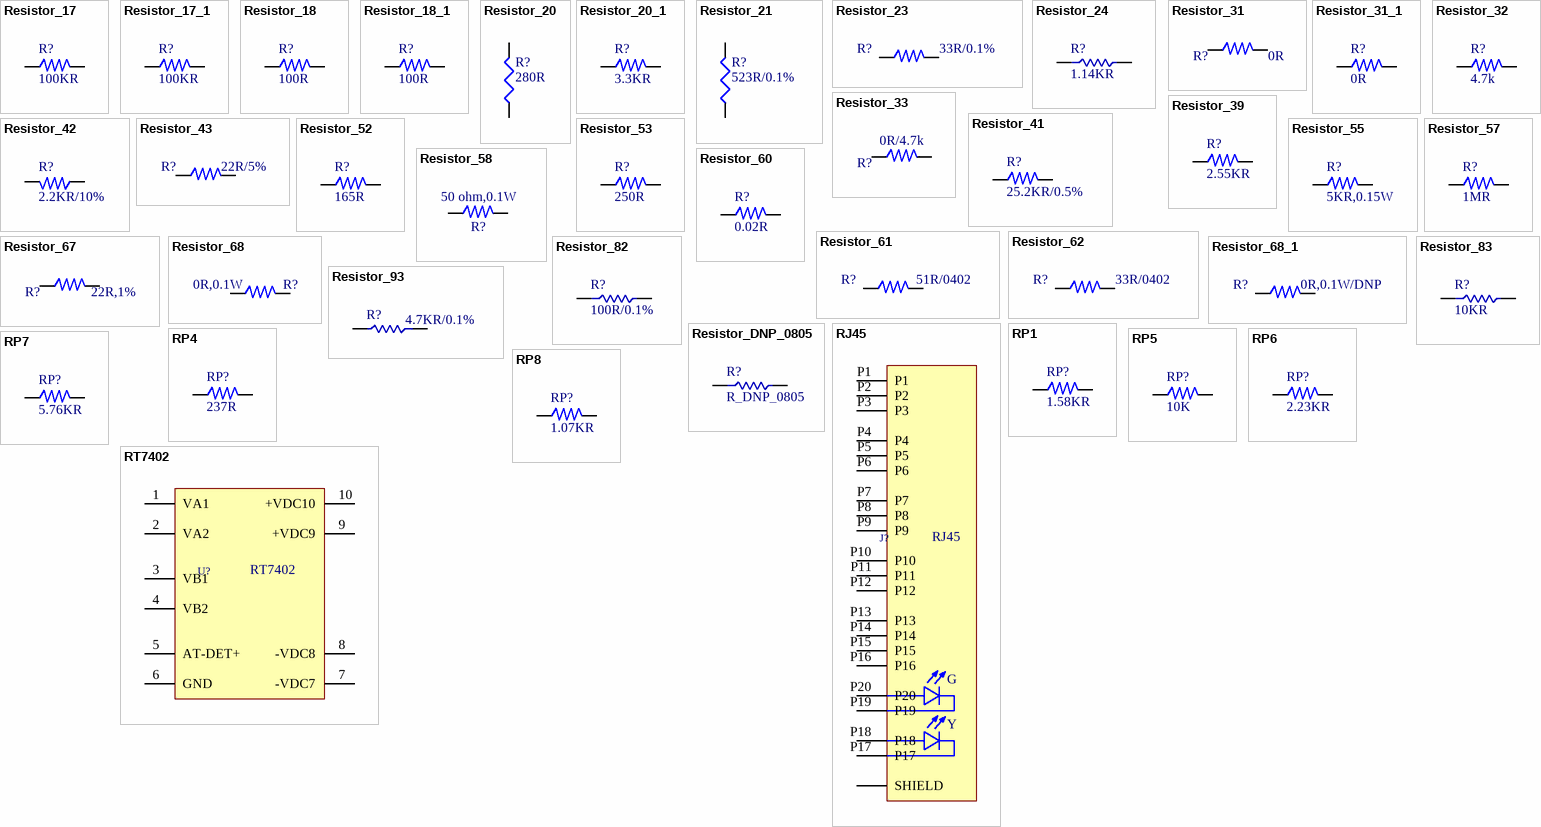
[diagram p22: symbols Resistor_17 to RT7402]

## Resistor_17
designator R?, comment 100KR
100KR, 0.25w, 1%; Manufacturer: Rohm Semiconductor; Manufacturer Part Number: ESR03EZPF1003; Package: 0603 (1608 Metric); Supplier: Digi-Key; Supplier Part Number: RHM100KADCT-ND; Value: 100KR
footprint RESC1608L (Chip Resistor, Body 1.6x0.8mm, IPC High Density)
pins: 1, 2

## Resistor_17_1
designator R?, comment 100KR
100KR, 0.25w, 1%; Manufacturer: Rohm Semiconductor; Manufacturer Part Number: ESR03EZPF1003; Package: 0603 (1608 Metric); Supplier: Digi-Key; Supplier Part Number: RHM100KADCT-ND; Value: 100KR
footprint CAPC1608L (Chip Capacitor, Body 1.6x0.8mm, IPC High Density)
pins: 1, 2

## Resistor_18
designator R?, comment 100R
100R, 0.25w, 1%; Manufacturer: Vishay Dale; Manufacturer Part Number: RCS0603100RFKEA; Package: 0603 (1608 Metric); Supplier: Digi-Key; Supplier Part Number: 541-2786-2-ND; Value: 100R
footprint RESC1608L (Chip Resistor, Body 1.6x0.8mm, IPC High Density)
pins: 1, 2

## Resistor_18_1
designator R?, comment 100R
100R, 0.25w, 1%; Manufacturer: Vishay Dale; Manufacturer Part Number: RCS0603100RFKEA; Package: 0603 (1608 Metric); Supplier: Digi-Key; Supplier Part Number: 541-2786-2-ND; Value: 100R
footprint CAPC1608L (Chip Capacitor, Body 1.6x0.8mm, IPC High Density)
pins: 1, 2

## Resistor_20
designator R?, comment 280R
280R, 1%; Manufacturer: Vishay Dale; Manufacturer Part Number: CRCW0603280RFKEA; Package: 0603; Value: 280R; Supplier: Digikey; Supplier Part Number: 71-CRCW0603-280-E3; Operating Temperature: -55°C ~ 155°C
footprint CAPC1608L (Chip Capacitor, Body 1.6x0.8mm, IPC High Density)
pins: 1, 2

## Resistor_20_1
designator R?, comment 3.3KR
3.3KR, 0.25w, 1%; Manufacturer: Panasonic Electronic Components; Manufacturer Part Number: ERJ-PA3F3301V; Package: 0603 (1608 Metric); Supplier: Digi-Key; Supplier Part Number: P3.3KBYCT-ND; Value: 3.3KR
footprint CAPC1608L (Chip Capacitor, Body 1.6x0.8mm, IPC High Density)
pins: 1, 2

## Resistor_21
designator R?, comment 523R/0.1%
RES SMD 523 OHM 0.1% 1/10W 0603; Manufacturer: Panasonic Electronic Components; Manufacturer Part Number: ERA-3AEB5230V; Value: 523R/0.1%; Package: 0603(1608); Supplier: Digi-Key; Supplier Part Number: P523DBCT-ND; Operating Temperature: -55°C ~ 155°C
footprint CAPC1608L (Chip Capacitor, Body 1.6x0.8mm, IPC High Density)
pins: 1, 2

## Resistor_23
designator R?, comment 33R/0.1%
RES SMD 33 OHM 0.1% 1/16W 0603; Manufacturer: TE Connectivity Passive Product; Manufacturer Part Number: CPF-A-0603B33RE; Package: 0603(1608); Supplier: Digikey; Supplier Part Number: A124038CT-ND; Value: 33R/0.1%; Operating Temperature: -55°C ~ 155°C
footprint CAPC1608L (Chip Capacitor, Body 1.6x0.8mm, IPC High Density)
pins: 1, 2

## Resistor_24
designator R?, comment 1.14KR
1.14KR, 0603, 1%, 10p pm, 63mW, 50V; Manufacturer: KOA Speer; Manufacturer Part Number: RN731JTTD1141F100; Package: 0603; Supplier Part Number: 660-RN731JTD1141F100; Value: 1.14KR; Supplier: Mouser
footprint CAPC1608L (Chip Capacitor, Body 1.6x0.8mm, IPC High Density)
pins: 1, 2

## Resistor_31
designator R?, comment 0R
Manufacturer: Yageo; Manufacturer Part Number: RC0603JR-070RL; Package: 0603 (1608 Metric); Supplier: Mouser; Supplier Part Number: 603-RC0603JR-070RL; Value: 0R
footprint RESC1608L (Chip Resistor, Body 1.6x0.8mm, IPC High Density)
pins: 1, 2

## Resistor_31_1
designator R?, comment 0R
Manufacturer: Yageo; Manufacturer Part Number: RC0603JR-070RL; Package: 0603 (1608 Metric); Supplier: Mouser; Supplier Part Number: 603-RC0603JR-070RL; Value: 0R
footprint CAPC1608L (Chip Capacitor, Body 1.6x0.8mm, IPC High Density)
pins: 1, 2

## Resistor_32
designator R?, comment 4.7k
4.7K OHM 1% 1/2W 0805; Manufacturer: Panasonic Electronic Components; Manufacturer Part Number: ERJ-P06F4701V; Package: 0805 (2012 Metric); Supplier: Digi-Key; Supplier Part Number: P16073TR-ND; Unit Price: 0.02170; Value: 4.7k
footprint RESC2012L (Chip Resistor, Body 2.0x1.3mm, IPC High Density)
pins: 1, 2

## Resistor_33
designator R?, comment 0R/4.7k
0 OHM JUMPER 1/2W 0805; Manufacturer: Vishay Dale; Manufacturer Part Number: CRCW08050000Z0EAHP; Package: 0805 (2012 Metric); Supplier: Digi-Key; Supplier Part Number: 541-0.0TBTR-ND; Unit Price: 0.02400; Value: 0R/4.7k
footprint RESC2012L (Chip Resistor, Body 2.0x1.3mm, IPC High Density)
pins: 1, 2

## Resistor_39
designator R?, comment 2.55KR
RES SMD 2.55K OHM 0.5% 1/5W 0603; Manufacturer: Panasonic Electronic Components; Manufacturer Part Number: ERJ-PB3D2551V; Package: 0603 (1608 Metric); Supplier Part Number: P20327TR-ND; Value: 2.55KR; Supplier: Digi-Key
footprint CAPC1608L (Chip Capacitor, Body 1.6x0.8mm, IPC High Density)
pins: 1, 2

## Resistor_41
designator R?, comment 25.2KR/0.5%
25.2KR; Manufacturer: Yageo; Manufacturer Part Number: RT0603DRE0725K2L; Package: 0603 (1608 Metric); Supplier: Digi-Key; Supplier Part Number: RT0603DRE0725K2L-ND; Value: 25.2KR/0.5%; Operating Temperature: -55°C ~ 155°C
footprint CAPC1608L (Chip Capacitor, Body 1.6x0.8mm, IPC High Density)
pins: 1, 2

## Resistor_42
designator R?, comment 2.2KR/10%
2.2KR; Manufacturer: Yageo; Manufacturer Part Number: SR0603KR-7W2K2L; Package: 0603 (1608 Metric); Supplier: Digi-Key; Supplier Part Number: SR0603KR-7W2K2L-ND; Value: 2.2KR/10%; Operating Temperature: -55°C ~ 155°C
footprint CAPC1608L (Chip Capacitor, Body 1.6x0.8mm, IPC High Density)
pins: 1, 2

## Resistor_43
designator R?, comment 22R/5%
22R; Manufacturer: Vishay Dale; Manufacturer Part Number: CRCW060322R0JNEAHP; Package: 0603 (1608 Metric); Supplier: Digi-Key; Supplier Part Number: 541-22SATR-ND; Value: 22R/5%; Operating Temperature: -55°C ~ 155°C
footprint CAPC1608L (Chip Capacitor, Body 1.6x0.8mm, IPC High Density)
pins: 1, 2

## Resistor_52
designator R?, comment 165R
RES SMD 165 OHM 1% 1/5W 0603; Manufacturer: TE Connectivity Passive Product; Manufacturer Part Number: CRGH0603F165R; Package: 0603 (1608 Metric); Supplier: Digi-Key; Supplier Part Number: CRGH0603F165R-ND; Value: 165R
footprint CAPC1608L (Chip Capacitor, Body 1.6x0.8mm, IPC High Density)
pins: 1, 2

## Resistor_53
designator R?, comment 250R
RES SMD 250 OHM 0.05% 0.15W 0603; Manufacturer: Vishay Thin Film; Manufacturer Part Number: PLT0603Z2500AST5; Package: 0603 (1608 Metric); Supplier: Digi-Key; Supplier Part Number: PLT0603-250ATR-ND; Value: 250R
footprint CAPC1608L (Chip Capacitor, Body 1.6x0.8mm, IPC High Density)
pins: 1, 2

## Resistor_55
designator R?, comment 5KR,0.15W
RES SMD 5K OHM 0.1% 0.15W 0603; Manufacturer: Vishay Thin Film; Manufacturer Part Number: PNM0603E5001BST5; Package: 0603 (1608 Metric); Supplier: Digi-Key; Supplier Part Number: PNM0603-5.0KBCT-ND; Value: 5KR,0.15W
footprint RESC1608L (Chip Resistor, Body 1.6x0.8mm, IPC High Density)
pins: 1, 2

## Resistor_57
designator R?, comment 1MR
Thick Film Resistors - SMD 0.25watt 1Mohms 5% 200ppm; Manufacturer: Vishay Dale; Manufacturer Part Number: RCS06031M00JNEA; Package: 0603 (1608 Metric); Supplier: Mouser; Supplier Part Number: 71-RCS06031M00JNEA; Value: 1MR
footprint CAPC1608L (Chip Capacitor, Body 1.6x0.8mm, IPC High Density)
pins: 1, 2

## Resistor_58
designator R?, comment 50 ohm,0.1W
RES SMD 50 OHM 1% 1/10W 0603; Manufacturer: Vishay Dale; Manufacturer Part Number: CRCW060350R0FKEA; Package: 0603 (1608 Metric); Supplier: Digi-Key; Supplier Part Number: 541-3318-2-ND; Value: 50 ohm,0.1W
footprint CAPC1608L (Chip Capacitor, Body 1.6x0.8mm, IPC High Density)
pins: 1, 2

## Resistor_60
designator R?, comment 0.02R
RES 0.02 OHM 1% 1/4W 0603; Manufacturer: Rohm Semiconductor; Manufacturer Part Number: UCR03EWPFSR020; Package: 0603 (1608 Metric); Supplier: Digi-Key; Supplier Part Number: RHM1264CT-ND; Value: 0.02R; Operating Temperature: -55°C ~ 155°C
footprint CAPC1608L (Chip Capacitor, Body 1.6x0.8mm, IPC High Density)
pins: 1, 2

## Resistor_61
designator R?, comment 51R/0402
RES SMD 51 OHM 1% 1/10W 0402; Manufacturer: Panasonic Electronic Components; Manufacturer Part Number: ERJ-2RKF51R0X; Package: 0402 (1005 Metric); Supplier: Digikey; Supplier Part Number: P51.0LCT-ND; Value: 51R/0402; Operating Temperature: -55°C ~ 155°C
footprint CAPC1005L (Chip Capacitor, Body 1.0x0.5mm, IPC High Density)
pins: 1, 2

## Resistor_62
designator R?, comment 33R/0402
RES SMD 33 OHM 1% 1/10W 0402; Manufacturer: Panasonic Electronic Components; Manufacturer Part Number: ERJ-2RKF33R0X; Package: 0402 (1005 Metric); Supplier: Digikey; Supplier Part Number: P33.0LCT-ND; Value: 33R/0402; Operating Temperature: -55°C ~ 155°C
footprint CAPC1005L (Chip Capacitor, Body 1.0x0.5mm, IPC High Density)
pins: 1, 2

## Resistor_67
designator R?, comment 22R,1%
RES SMD 22 OHM 1% 1/16W 0402; Manufacturer: Yageo; Manufacturer Part Number: RC0402FR-0722RL; Package: 0402 (1005 Metric); Supplier: Digikey; Supplier Part Number: 311-22.0LRTR-ND; Value: 22R,1%
footprint CAPC1005L (Chip Capacitor, Body 1.0x0.5mm, IPC High Density)
pins: 1, 2

## Resistor_68
designator R?, comment 0R,0.1W
RES SMD 0 OHM JUMPER 1/10W 0402; Manufacturer: Panasonic Electronic Components; Manufacturer Part Number: ERJ-2GE0R00X; Package: 0402 (1005 Metric); Supplier: Digikey; Supplier Part Number: P0.0JTR-ND; Value: 0R,0.1W
footprint CAPC1005L (Chip Capacitor, Body 1.0x0.5mm, IPC High Density)
pins: 1, 2

## Resistor_68_1
designator R?, comment 0R,0.1W/DNP
RES SMD 0 OHM JUMPER 1/10W 0402; Manufacturer: Panasonic Electronic Components; Manufacturer Part Number: ERJ-2GE0R00X; Package: 0402 (1005 Metric); Supplier: Digikey; Supplier Part Number: P0.0JTR-ND; Value: 0R,0.1W/DNP
footprint CAPC1005L (Chip Capacitor, Body 1.0x0.5mm, IPC High Density)
pins: 1, 2

## Resistor_82
designator R?, comment 100R/0.1%
100R 0.1% 1/10W 0603; Manufacturer: Panasonic Electronic Components; Manufacturer Part Number: ERA-3AEB101V; Package: 0603 (1608 Metric); Supplier Part Number: P100DBTR-ND; Value: 100R/0.1%; Supplier: Digi-Key; Operating Temperature: -55°C ~ 155°C; Supplier Availability: Active
footprint CAPC1608L (Chip Capacitor, Body 1.6x0.8mm, IPC High Density)
pins: 1, 2

## Resistor_83
designator R?, comment 10KR
RES 10K OHM 0.5% 1/4W 0603; Manufacturer: Vishay Beyschlag; Manufacturer Part Number: MCT0603PD1002DP500; Package: 0603 (1608 Metric); Supplier Part Number: 749-1528-1-ND; Value: 10KR; Supplier: Digi-Key; Operating Temperature: -55°C ~ 175°C; Supplier Availability: Active
footprint CAPC1608L (Chip Capacitor, Body 1.6x0.8mm, IPC High Density)
pins: 1, 2

## Resistor_93
designator R?, comment 4.7KR/0.1%
4.7KR 0.1% 1/10W 0603; Manufacturer: Panasonic Electronic Components; Manufacturer Part Number: ERA-3AEB472V; Package: 0603 (1608 Metric); Supplier Part Number: P4.7KDBTR-ND; Value: 4.7KR/0.1%; Supplier: Digi-Key; Operating Temperature: -55°C ~ 155°C
footprint CAPC1608L (Chip Capacitor, Body 1.6x0.8mm, IPC High Density)
pins: 1, 2

## Resistor_DNP_0805
designator R?, comment R_DNP_0805
Package: 0805(2012); Value: R_DNP_0805
footprint RESC2012L (Chip Resistor, Body 2.0x1.3mm, IPC High Density)
pins: 1, 2

## RJ45
designator J?
Modular Connectors / Ethernet Connectors RJ45 JACK MAG. POE 1GB LED 1X1 INV.; Manufacturer: TE Connectivity; Manufacturer Part Number: 2337992-5; Package: TH; Supplier: Mouser; Supplier Part Number: 571-2337992-5; Temperature: -55 to 155; Value: RJ45
pins: P1, P2, P3, P4, P5, P6, P7, P8, P9, P10, P11, P12, P13, P14, P15, P16, P17, P18, P19, P20, S1 SHIELD, S2 SHIELD
text: G; Y

## RP1
designator RP?, comment 1.58KR
RES SMD 1.58K OHM 0.5% 1/5W 0603; Manufacturer: Panasonic Electronic Components; Manufacturer Part Number: ERJ-PB3D1581V; Package: 0603 (1608 Metric); Supplier: Digi-Key; Supplier Part Number: P20303TR-ND; Value: 1.58KR
footprint CAPC1608L (Chip Capacitor, Body 1.6x0.8mm, IPC High Density)
pins: 1, 2

## RP4
designator RP?, comment 237R
RES SMD 237 OHM 1% 1/4W 0603; Manufacturer: Vishay Dale; Manufacturer Part Number: CRCW0603237RFKEAHP; Package: 0603 (1608 Metric); Supplier: Digi-Key; Supplier Part Number: 541-237SCT-ND; Value: 237R
footprint CAPC1608L (Chip Capacitor, Body 1.6x0.8mm, IPC High Density)
pins: 1, 2

## RP5
designator RP?, comment 10K
RES SMD 10K OHM 1% 1/8W 0805; Manufacturer: Vishay Dale; Manufacturer Part Number: CRCW080510K0FKEA; Package: 0805 (2012 Metric); Supplier: Digi-Key; Supplier Part Number: 541-10.0KCCT-ND; Value: 10K
footprint RESC2012L (Chip Resistor, Body 2.0x1.3mm, IPC High Density)
pins: 1, 2

## RP6
designator RP?, comment 2.23KR
2.23 kOhms ±0.1% 0.125W, 1/8W Chip Resistor 0805 (2012 Metric) Moisture Resistant Thin Film; Manufacturer: Yageo; Manufacturer Part Number: RT0805BRD072K23L; Package: 0805 (2012 Metric); Supplier: Digi-Key; Supplier Part Number: RT0805BRD072K23L-ND; Value: 2.23KR
footprint RESC2012L (Chip Resistor, Body 2.0x1.3mm, IPC High Density)
pins: 1, 2

## RP7
designator RP?, comment 5.76KR
RES SMD 5.76K OHM 1% 1/4W 0603; Manufacturer: Vishay Dale; Manufacturer Part Number: CRCW06035K76FKEAHP; Package: 0603 (1608 Metric); Supplier: Digi-Key; Supplier Part Number: CRCW06035K76FKEAHP-ND; Value: 5.76KR
footprint CAPC1608L (Chip Capacitor, Body 1.6x0.8mm, IPC High Density)
pins: 1, 2

## RP8
designator RP?, comment 1.07KR
MCT 0603-50 1% P5 1K07; Manufacturer: Vishay Beyschlag; Manufacturer Part Number: MCT06030C1071FP500; Package: 0603 (1608 Metric); Supplier: Digi-Key; Supplier Part Number: MCT06030C1071FP500-ND; Value: 1.07KR
footprint CAPC1608L (Chip Capacitor, Body 1.6x0.8mm, IPC High Density)
pins: 1, 2

## RT7402
designator U?
Manufacturer: Aliexpress; Package: TH; Manufacturer Part Number: RT7402; Value: RT7402
pins: 1 VA1, 2 VA2, 3 VB1, 4 VB2, 5 AT-DET+, 6 GND, 7 -VDC7, 8 -VDC8, 9 +VDC9, 10 +VDC10

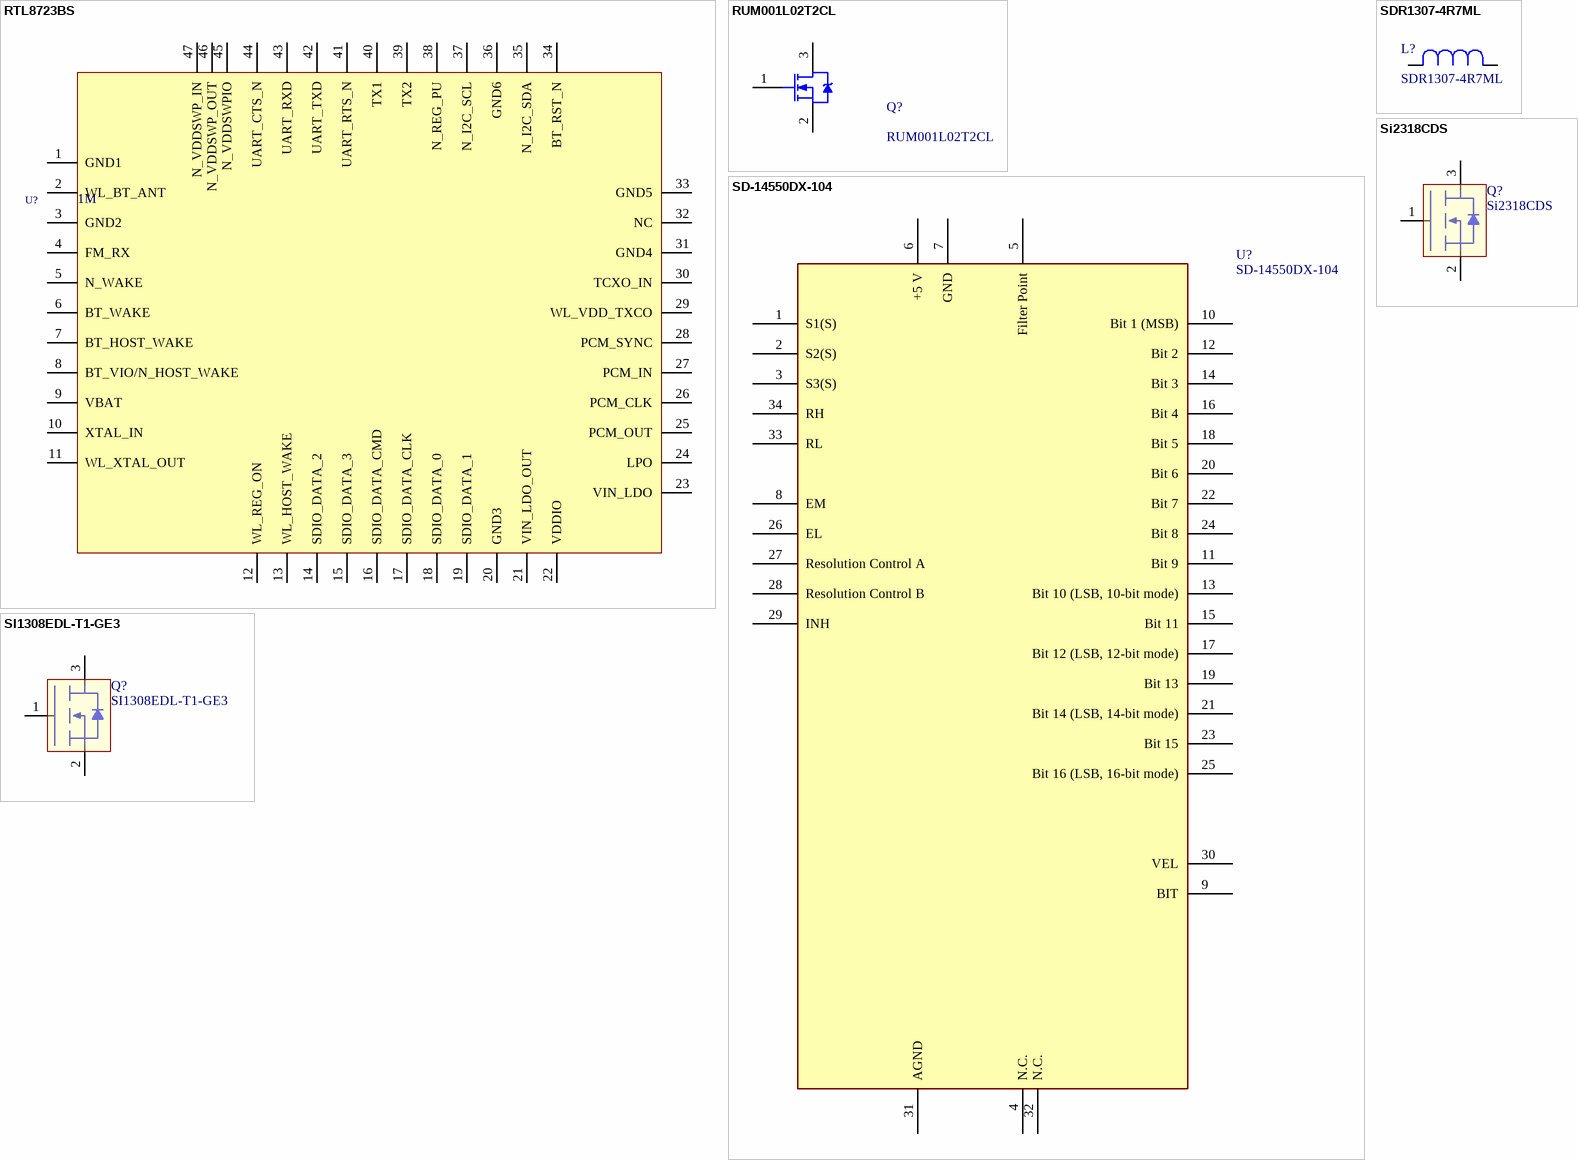
[diagram p23: symbols RTL8723BS to Si2318CDS]

## RTL8723BS
designator U?, comment 1M
Realtek RTL8723BS 150Mbps 2.4GHz wireless WiFi + BT SDIO Module Bluetooth RTL8723 PCBA Linux Android IOS WIN7 Custom; Package: Module; Manufacturer: Realtek; Manufacturer Part Number: RTL8723BS; Supplier: Aliexpress; Supplier Part Number: https://www.aliexpress.com/item/32818005861.html; Temperature: -55 to 155; Value: 1M
pins: 1 GND1, 2 WL_BT_ANT, 3 GND2, 4 FM_RX, 5 N_WAKE, 6 BT_WAKE, 7 BT_HOST_WAKE, 8 BT_VIO/N_HOST_WAKE , 9 VBAT, 10 XTAL_IN, 11 WL_XTAL_OUT, 12 WL_REG_ON, 13 WL_HOST_WAKE, 14 SDIO_DATA_2, 15 SDIO_DATA_3, 16 SDIO_DATA_CMD, 17 SDIO_DATA_CLK, 18 SDIO_DATA_0, 19 SDIO_DATA_1, 20 GND3, 21 VIN_LDO_OUT, 22 VDDIO, 23 VIN_LDO, 24 LPO, 25 PCM_OUT, 26 PCM_CLK, 27 PCM_IN, 28 PCM_SYNC, 29 WL_VDD_TXCO, 30 TCXO_IN, 31 GND4, 32 NC, 33 GND5, 34 BT_RST_N, 35 N_I2C_SDA, 36 GND6, 37 N_I2C_SCL, 38 N_REG_PU, 39 TX2, 40 TX1, 41 UART_RTS_N, 42 UART_TXD, 43 UART_RXD, 44 UART_CTS_N, 45 N_VDDSWPIO, 46 N_VDDSWP_OUT, 47 N_VDDSWP_IN

## RUM001L02T2CL
designator Q?
20V 100mA 150mW 3.5Ω@4.5V,100mA 1V@100uA 1PCSNChannel SOT-723 MOSFETs ROHS; Manufacturer: ROHM Semicon; Manufacturer Part Number: RUM001L02T2CL; Package: SOT-723; Supplier: LCSC; Supplier Part Number: C253528; Value: RUM001L02T2CL
pins: 1 G, 2 S, 3 D

## SD-14550DX-104
designator U?
Synchro- or Resolver-to-Digital converters based on a singlechip  monolithic; Manufacturer: DDC; Value: SD-14550DX-104; Operating Temperature: -55°C ~ 125°C; Manufacturer Part Number: SD-14550DX-104
footprint SD-1455X
pins: 1 S1(S), 2 S2(S), 3 S3(S), 4 N.C., 5 Filter Point, 6 +5 V, 7 GND, 8 EM, 9 BIT, 10 Bit 1 (MSB), 11 Bit 9, 12 Bit 2, 13 Bit 10 (LSB, 10-bit mode), 14 Bit 3, 15 Bit 11, 16 Bit 4, 17 Bit 12 (LSB, 12-bit mode), 18 Bit 5, 19 Bit 13, 20 Bit 6, 21 Bit 14 (LSB, 14-bit mode), 22 Bit 7, 23 Bit 15, 24 Bit 8, 25 Bit 16 (LSB, 16-bit mode), 26 EL, 27 Resolution Control A, 28 Resolution Control B, 29 INH, 30 VEL, 31 AGND, 32 N.C., 33 RL, 34 RH

## SDR1307-4R7ML
designator L?
FIXED IND 4.7uH 7A 10mΩ SMD,13x13mm; Manufacturer: Bourns Electronics; Package: SMD,13x13mm; Manufacturer_Part_Number: SDR1307-4R7ML; LCSC: C2046624
footprint IND_BOURNS_SDR1307
pins: 1, 2

## SI1308EDL-T1-GE3
designator Q?
MOSFET N-CH 30V 1.4A SOT323; Manufacturer: Vishay Siliconix; Manufacturer Availability: Active; Manufacturer Part Number: SI1308EDL-T1-GE3; Package: SOT323; Supplier Part Number: SI1308EDL-T1-GE3CT-ND; Supplier: DigiKey; Value: SI1308EDL-T1-GE3; Operating Temperature: -55°C ~ 150°C (TJ)
footprint SI1308EDL-T1-GE3
pins: 1, 2, 3

## Si2318CDS
designator Q?
MOSFET N-CH 40V 5.6A SOT-23; Manufacturer: VISHAY; Manufacturer Part Number: Si2318CDS-T1-GE3; Package: SOT-23; Supplier Part Number: C14498; Supplier: LCSC; Value: Si2318CDS
footprint SOT23
pins: 1, 2, 3

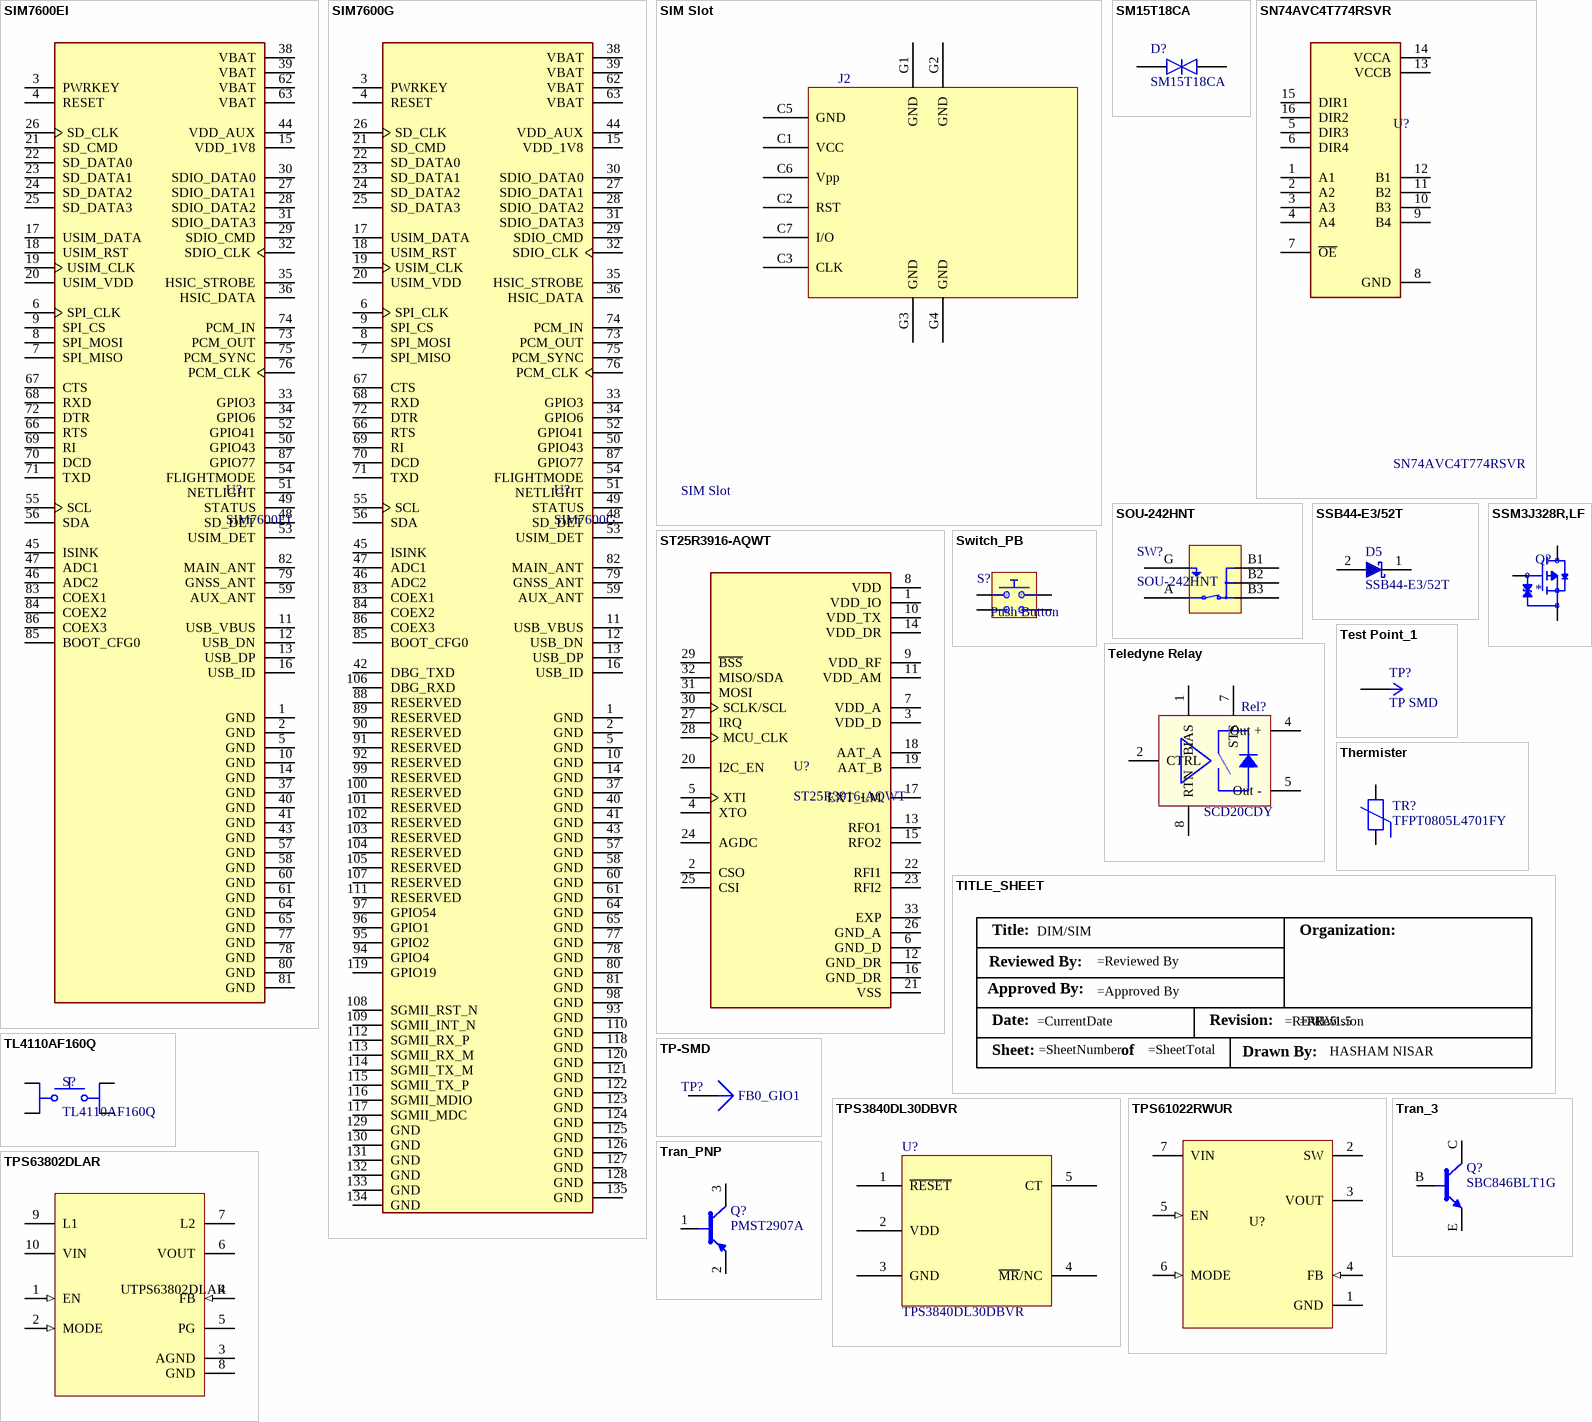
[diagram p24: symbols SIM7600EI to Tran_PNP]

## SIM7600EI
designator U?
RF TXRX MODULE CELLULAR LTE SMD; Manufacturer: SIMCom Wireless Solutions Limited; Manufacturer Part Number: SIM7600E; Package: Module; Supplier: Digi-Key; Supplier Part Number: 3781-SIM7600E-ND; Value: SIM7600EI
footprint SIM7600EI
pins: 1 GND, 2 GND, 3 PWRKEY, 4 RESET, 5 GND, 6 SPI_CLK, 7 SPI_MISO, 8 SPI_MOSI, 9 SPI_CS, 10 GND, 11 USB_VBUS, 12 USB_DN, 13 USB_DP, 14 GND, 15 VDD_1V8, 16 USB_ID, 17 USIM_DATA, 18 USIM_RST, 19 USIM_CLK, 20 USIM_VDD, 21 SD_CMD, 22 SD_DATA0, 23 SD_DATA1, 24 SD_DATA2, 25 SD_DATA3, 26 SD_CLK, 27 SDIO_DATA1, 28 SDIO_DATA2, 29 SDIO_CMD, 30 SDIO_DATA0, 31 SDIO_DATA3, 32 SDIO_CLK, 33 GPIO3, 34 GPIO6, 35 HSIC_STROBE, 36 HSIC_DATA, 37 GND, 38 VBAT, 39 VBAT, 40 GND, 41 GND, 43 GND, 44 VDD_AUX, 45 ISINK, 46 ADC2, 47 ADC1, 48 SD_DET, 49 STATUS, 50 GPIO43, 51 NETLIGHT, 52 GPIO41, 53 USIM_DET, 54 FLIGHTMODE, 55 SCL, 56 SDA, 57 GND, 58 GND, 59 AUX_ANT, 60 GND, 61 GND, 62 VBAT, 63 VBAT, 64 GND, 65 GND, 66 RTS, 67 CTS, 68 RXD, 69 RI, 70 DCD, 71 TXD, 72 DTR, 73 PCM_OUT, 74 PCM_IN, 75 PCM_SYNC, 76 PCM_CLK, 77 GND, 78 GND, 79 GNSS_ANT, 80 GND, 81 GND, 82 MAIN_ANT, 83 COEX1, 84 COEX2, 85 BOOT_CFG0, 86 COEX3, 87 GPIO77

## SIM7600G
designator U?
RF TXRX MODULE CELLULAR LTE SMD; Manufacturer: SIMCom Wireless Solutions Limited; Manufacturer Part Number: SIM7600G; Package: Module; Value: SIM7600G
footprint SIM7600G
pins: 1 GND, 2 GND, 3 PWRKEY, 4 RESET, 5 GND, 6 SPI_CLK, 7 SPI_MISO, 8 SPI_MOSI, 9 SPI_CS, 10 GND, 11 USB_VBUS, 12 USB_DN, 13 USB_DP, 14 GND, 15 VDD_1V8, 16 USB_ID, 17 USIM_DATA, 18 USIM_RST, 19 USIM_CLK, 20 USIM_VDD, 21 SD_CMD, 22 SD_DATA0, 23 SD_DATA1, 24 SD_DATA2, 25 SD_DATA3, 26 SD_CLK, 27 SDIO_DATA1, 28 SDIO_DATA2, 29 SDIO_CMD, 30 SDIO_DATA0, 31 SDIO_DATA3, 32 SDIO_CLK, 33 GPIO3, 34 GPIO6, 35 HSIC_STROBE, 36 HSIC_DATA, 37 GND, 38 VBAT, 39 VBAT, 40 GND, 41 GND, 42 DBG_TXD, 43 GND, 44 VDD_AUX, 45 ISINK, 46 ADC2, 47 ADC1, 48 SD_DET, 49 STATUS, 50 GPIO43, 51 NETLIGHT, 52 GPIO41, 53 USIM_DET, 54 FLIGHTMODE, 55 SCL, 56 SDA, 57 GND, 58 GND, 59 AUX_ANT, 60 GND, 61 GND, 62 VBAT, 63 VBAT, 64 GND, 65 GND, 66 RTS, 67 CTS, 68 RXD, 69 RI, 70 DCD, 71 TXD, 72 DTR, 73 PCM_OUT, 74 PCM_IN, 75 PCM_SYNC, 76 PCM_CLK, 77 GND, 78 GND, 79 GNSS_ANT, 80 GND, 81 GND, 82 MAIN_ANT, 83 COEX1, 84 COEX2, 85 BOOT_CFG0, 86 COEX3, 87 GPIO77, 88 RESERVED, 89 RESERVED, 90 RESERVED, 91 RESERVED, 92 RESERVED, 93 GND, 94 GPIO4, 95 GPIO2, 96 GPIO1, 97 GPIO54, 98 GND, 99 RESERVED, 100 RESERVED, 101 RESERVED, 102 RESERVED, 103 RESERVED, 104 RESERVED, 105 RESERVED, 106 DBG_RXD, 107 RESERVED, 108 SGMII_RST_N, 109 SGMII_INT_N, 110 GND, 111 RESERVED, 112 SGMII_RX_P, 113 SGMII_RX_M, 114 SGMII_TX_M, 115 SGMII_TX_P, 116 SGMII_MDIO, 117 SGMII_MDC, 118 GND, 119 GPIO19, 120 GND, 121 GND, 122 GND, 123 GND, 124 GND, 125 GND, 126 GND, 127 GND, 128 GND, 129 GND, 130 GND, 131 GND, 132 GND, 133 GND, 134 GND, 135 GND

## SIM Slot
designator J2
micro-SIM Card Socket without Detect Switch, 1.45mm Height, Push-Pull Eject,  Surface Mount, 6 Circuits, Low-Halogen, Lead-Free; Manufacturer:: Hanbo Electronic; SPN: C961687; Number of Contacts:: 6; Value: SIM Slot; Supplier: LCSC; MPN: SMO-1535
pins: C1 VCC, C2 RST, C3 CLK, C5 GND, C6 Vpp, C7 I/O, G1 GND, G2 GND, G3 GND, G4 GND

## SM15T18CA
designator D?
Bidirectional Diode TVS DIODE 15.3VWM 25.2VC SMC; Manufacturer Part Number: SM15T18CA-E3/57T; Manufacturer: Vishay Semiconductor Diodes Division; Supplier Part Number: SM15T18CA-E3/57TGITR-ND; Supplier: Digi-Key; Package: DO-214AB, SMC; Value: SM15T18CA; Operating Temperature: -65°C ~ 150°C (TJ); Supplier Availability: Active
footprint SM15T18CA-E3/57T
pins: 1, 2

## SN74AVC4T774RSVR
designator U?
Translation - Voltage Levels 4B Dual-Supply Bus Xcvr; Manufacturer: Texas Instruments; Manufacturer Part Number: SN74AVC4T774RSVR; Package: SMD; Supplier: Mouser; Supplier Part Number: 595-SN74AVC4T774RSVR; Unit Price: *; Value: SN74AVC4T774RSVR
footprint SN74AVC4T774RSVR
pins: 1 A1, 2 A2, 3 A3, 4 A4, 5 DIR3, 6 DIR4, 7 ~{OE}, 8 GND, 9 B4, 10 B3, 11 B2, 12 B1, 13 VCCB, 14 VCCA, 15 DIR1, 16 DIR2

## SOU-242HNT
designator SW?
Description; MF: Mitsumi; Copyright: Copyright (C) 2025 Ultra Librarian. All rights reserved.; MPN: SOU-242HNT; RefDes: RefDes; Type: Type
footprint SOU-242HNT_MIT
pins: A, B1, B2, B3, G

## SSB44-E3/52T
designator D5
Rectifier Diode, Schottky, 1 Phase, 1 Element, 4A, 40V V(RRM), Silicon, DO-214AA; Manufacturer: Vishay Semiconductors; Supplier 1: Mouser; Manufacturer Part Number: SSB44-E3/52T; RoHS: Yes; ComponentLink1URL: https://datasheet.ciiva.com/23793/1749685-23793352.pdf?src-supplier=Newark; ComponentLink1Description: https://datasheet.ciiva.com/23793/1749685-23793352.pdf?src-supplier=Newark
footprint DO214AA
pins: 1 K, 2 A

## SSM3J328R,LF
designator Q?
P-Channel 20 V 6A (Ta) 1W (Ta) Surface Mount SOT-23F; MF: Toshiba; MP: SSM3J328R,LF; LCSC: C396016
footprint SOT95P240X88-3N
pins: 1 G, 2 S, 3 D

## ST25R3916-AQWT
designator U?
RFID Reader/Transponder IC - FeliCa, ISO 14443, ISO 15693, MIFARE, NFC IÂ²C, SPI 2.4V ~ 5.5V 32-VFQFN Exposed Pad; MF: STMicroelectronics; Package: VFQFN-32(5x5); Value: ST25R3916-AQWT; MPN: ST25R3916-AQWT; LCSC: C2908147
footprint QFN50P500X500X100-33N
pins: 1 VDD_IO, 2 CSO, 3 VDD_D, 4 XTO, 5 XTI, 6 GND_D, 7 VDD_A, 8 VDD, 9 VDD_RF, 10 VDD_TX, 11 VDD_AM, 12 GND_DR, 13 RFO1, 14 VDD_DR, 15 RFO2, 16 GND_DR, 17 EXT_LM, 18 AAT_A, 19 AAT_B, 20 I2C_EN, 21 VSS, 22 RFI1, 23 RFI2, 24 AGDC, 25 CSI, 26 GND_A, 27 IRQ, 28 MCU_CLK, 29 ~{BSS}, 30 SCLK/SCL, 31 MOSI, 32 MISO/SDA, 33 EXP

## Switch_PB
designator S?, comment Push Button
Switch Tactile SPST-NO 0.02A 15V; Manufacturer: E-Switch; Manufacturer Part Number: TL3700AF100QG; Value: Push Button; Package: 3.00mm x 2.60mm; Supplier: Digikey; Supplier Part Number: EG4918CT-ND; Operating Temperature: -40°C ~ 85°C
footprint SWITCH_1 (TL3700AF100QG)
pins: 1, 2, 3, 4

## Teledyne Relay
designator Rel?, comment SCD20CDY
Solid State Relays - PCB Mount Relay; Manufacturer: Teledyne Relays; Manufacturer Part Number: SCD20CDY; Package: SMD; Supplier: Mouser; Supplier Part Number: 881-SCD20CDY; Unit Price: 161€; Value: SCD20CDY
footprint CD20CDY
pins: 1 BIAS, 2 CTRL, 4 Out +, 5 Out -, 7 STS, 8 RTN